# Altium footprint library amirlib.PcbLib: 456 footprints (part 2 of 29)
Each footprint in its own frame and in the unit in brackets; x right, y up, seen from the top. Pads: shape width x height; smd on the part's side, far side on the other; paste and mask are expansions set on the pad; w line width, h text height; cw(c..) or ccw(c..) is an arc to the next point about the centre after c.
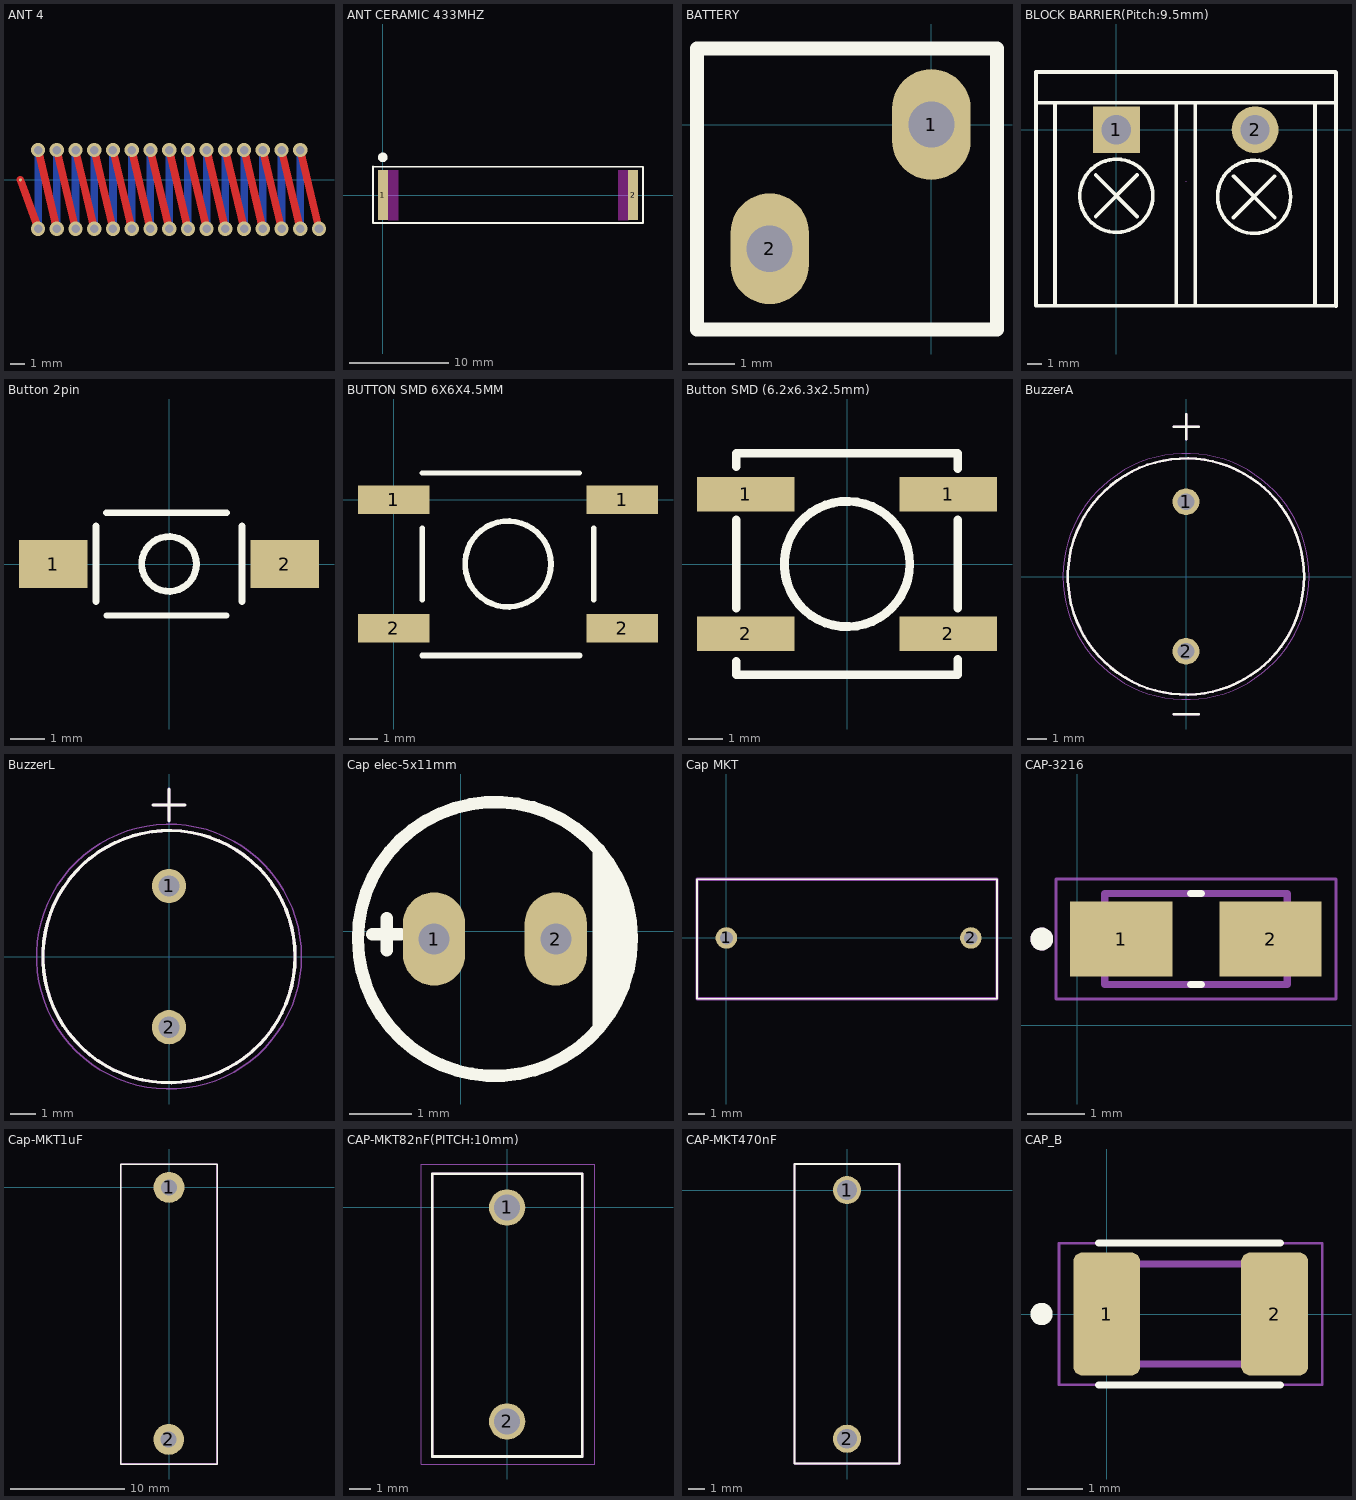
[diagram p1: the footprints below, top view; thin cyan lines are the x and y axes]

## ANT 4 [mm]
pads (1):
  round 0.2 smd: 1(2.642,-0.025)
via 18.349,-3.454 diameter 1 hole 0.6
via 7.827,2.07 diameter 1 hole 0.6
via 3.881,2.07 diameter 1 hole 0.6
via 6.512,2.07 diameter 1 hole 0.6
via 5.196,2.07 diameter 1 hole 0.6
via 5.196,-3.454 diameter 1 hole 0.6
via 6.512,-3.454 diameter 1 hole 0.6
via 13.088,-3.454 diameter 1 hole 0.6
via 20.98,2.07 diameter 1 hole 0.6
via 20.98,-3.454 diameter 1 hole 0.6
via 19.664,2.07 diameter 1 hole 0.6
via 17.034,2.07 diameter 1 hole 0.6
via 18.349,2.07 diameter 1 hole 0.6
via 14.403,2.07 diameter 1 hole 0.6
via 15.718,2.07 diameter 1 hole 0.6
via 14.403,-3.454 diameter 1 hole 0.6
via 15.719,-3.454 diameter 1 hole 0.6
via 17.034,-3.454 diameter 1 hole 0.6
via 19.664,-3.454 diameter 1 hole 0.6
via 13.088,2.07 diameter 1 hole 0.6
via 10.458,-3.454 diameter 1 hole 0.6
via 9.142,-3.454 diameter 1 hole 0.6
via 7.827,-3.454 diameter 1 hole 0.6
via 11.773,-3.454 diameter 1 hole 0.6
via 22.296,-3.454 diameter 1 hole 0.6
via 11.773,2.07 diameter 1 hole 0.6
via 10.458,2.07 diameter 1 hole 0.6
via 9.142,2.07 diameter 1 hole 0.6
via 22.296,2.07 diameter 1 hole 0.6
via 23.612,-3.454 diameter 1 hole 0.6
via 3.881,-3.454 diameter 1 hole 0.6
Top Layer:
  lines w0.5: 6.366,-3.342 ccw(c6.719,-2.988) 6.366,-3.342
  lines w0.536: 2.642,-0.025 3.892,-3.454 ; 3.881,2.07 5.196,-3.454 ; 5.196,2.07 6.512,-3.454 6.428,-3.395 6.395,-3.371 6.366,-3.342 ; 6.512,2.07 7.827,-3.454 ; 7.827,2.07 9.142,-3.454 ; 9.142,2.07 10.458,-3.454 ; 10.458,2.07 11.773,-3.454 ; 11.773,2.07 13.088,-3.454 ; 13.088,2.07 14.403,-3.454 ; 14.403,2.07 15.719,-3.454 ; 15.718,2.07 17.034,-3.454 ; 17.034,2.07 18.349,-3.454 ; 18.349,2.07 19.664,-3.454 ; 19.664,2.07 20.98,-3.454 ; 20.98,2.07 22.296,-3.454 ; 22.296,2.07 23.612,-3.454 ; 5.364,2.158 5.364,2.158
Bottom Layer:
  lines w0.536: 3.881,-3.454 3.881,2.07 ; 5.196,-3.454 5.196,2.07 ; 6.512,-3.454 6.512,2.07 ; 7.827,-3.454 7.827,2.07 ; 9.142,-3.454 9.142,2.07 ; 10.458,-3.454 10.458,2.07 ; 11.773,-3.454 11.773,2.07 ; 13.088,-3.454 13.088,2.07 ; 14.403,-3.454 14.403,2.07 ; 17.034,-3.454 17.034,2.07 ; 18.349,-3.454 18.349,2.07 ; 19.664,-3.454 19.664,2.07 ; 20.98,-3.454 20.98,2.07 ; 22.296,-3.454 22.296,2.07 ; 15.719,-3.454 15.719,2.07 ; 15.719,-3.454 15.719,-3.454 ; 15.718,2.07 15.719,2.07

## ANT CERAMIC 433MHZ [mm]
pads (2):
  rect 1x5 smd: 1(0,0) 2(25,0)
Top Overlay:
  circle w0.5: c-0.025,3.785 r0.23
  lines w0.2: -1,-2.759 26,-2.771 26,2.845 -1,2.857 -1,-2.759
Keep-Out Layer:
  region: 23.543,2.5 24.5,2.5 24.5,-2.5 23.543,-2.5
  region: 0.543,2.5 1.5,2.5 1.5,-2.5 0.543,-2.5
3D body: height 1.2, standoff 0, extent 0.5,-2.5 24.5,2.5
3D body: height 1.2, standoff 0.05, extent 2,-0.389 3.93,0.5
3D body: height 1.2, standoff 0, extent 0,-2.5 0.5,2.5
3D body: height 1.2, standoff 0, extent 24.5,-2.5 25,2.5

## BATTERY [mm]
pads (2):
  oval 1.7x2.4 hole 1 square: 1(0,0) 2(-3.505,-2.692)
Top Overlay:
  lines w0.3: -5.08,-4.445 1.422,-4.445 1.422,1.651 -5.08,1.651 -5.08,-4.445

## BLOCK BARRIER(Pitch:9.5mm) [mm]
pads (2):
  rect 3.21x3.2 hole 2 paste-2539.97 mask+0.051: 1(0,0)
  round 3.2 hole 2 paste-2539.97 mask+0.051: 2(9.5,0)
Top Overlay:
  circle w0.254: c9.43,-4.59 r2.5
  circle w0.254: c0,-4.52 r2.5
  lines w0.254: -5.5,1.855 15,1.855 ; -4.2,-12.051 -4.2,1.749 ; -1.414,-5.934 1.414,-3.106 ; -1.414,-3.106 1.414,-5.934 ; 4.1,-12.051 4.1,1.749 ; 5.4,-12.051 5.4,1.749 ; 8.016,-6.004 10.844,-3.176 ; 8.016,-3.176 10.844,-6.004 ; 13.6,-12.051 13.6,1.749 ; 15,-12.051 -5.5,-12.051 -5.5,3.949 15,3.949 ; 15.037,-12.065 15.037,3.937
Mechanical 15:
  lines w0.003: 4.768,-3.525 4.769,-3.524
3D body "C601239_HB9500M_9p5_2P.step": height 15.4, standoff -5.75, extent -5.376,-14.499 14.824,3.776

## Button 2pin [mm]
pads (2):
  rect 2x1.4 smd: 1(-3.382,0) 2(3.382,0)
Top Overlay:
  circle w0.2: c0,0 r0.8
  lines w0.178: -1.824,-1.499 1.676,-1.499
  lines w0.2: -2.134,-1.092 -2.134,1.108 ; -1.824,1.499 1.676,1.499 ; 2.134,-1.092 2.134,1.108
3D body "434121025816.stp": height 2.5, standoff 0, extent -3.65,-1.975 3.65,1.925

## BUTTON SMD 6X6X4.5MM [mm]
pads (4):
  rect 2.5x1 smd: 1(0,0) 1(7.985,0) 2(0,-4.5) 2(7.985,-4.5)
Top Overlay:
  circle w0.2: c3.992,-2.25 r1.5
  lines w0.178: 0.995,0.925 6.495,0.925
  lines w0.2: 0.992,-3.5 0.992,-1 ; 0.995,-5.45 6.495,-5.45 ; 6.992,-3.5 6.992,-1
3D body "SW3dPS-switch.STEP": height 5, standoff 0, extent -0.507,-5.25 8.493,0.75

## Button SMD (6.2x6.3x2.5mm) [mm]
pads (4):
  rect 2.8x1 smd paste+0 mask+0.051: 1(-2.9,2) 1(2.9,2) 2(-2.9,-2) 2(2.9,-2)
Top Overlay:
  circle w0.254: c0.001,0 r1.797
  lines w0.254: -3.175,-2.794 -3.175,-3.175 3.175,-3.175 3.175,-2.731 ; -3.175,-1.27 -3.175,1.27 ; -3.175,2.794 -3.175,3.175 3.175,3.175 3.175,2.731 ; 3.175,-1.27 3.175,1.269
3D body "43418.stp": height 2.5, standoff 0, extent -3.549,-3.15 3.651,3.15

## BuzzerA [mm]
pads (2):
  round 1.358 hole 0.85: 1(0,3.8) 2(0,-3.8)
Top Overlay:
  circle w0.127: c0,0 r6
  lines w0.127: -0.635,-6.985 0.635,-6.985 ; -0.635,7.62 0.635,7.62 ; 0,6.985 0,8.255
Mechanical 13:
  circle w0.127: c0,0 r6
  lines w0.127: -0.635,-6.985 0.635,-6.985 ; -0.635,7.62 0.635,7.62 ; 0,6.985 0,8.255
Mechanical 15:
  circle w0.05: c0,0 r6.25
3D body "AI-1223-TWT-12V-R--3DModel-STEP-1.STEP": height 9.6, standoff -5.95, extent -6,-5.949 6,7.491

## BuzzerL [mm]
pads (2):
  round 1.358 hole 0.85: 1(0,2.8) 2(0,-2.8)
Top Overlay:
  circle w0.127: c0,0 r5
  lines w0.127: -0.635,6.01 0.635,6.01 ; 0,5.375 0,6.645
Mechanical 13:
  circle w0.127: c0,0 r5
  lines w0.127: -0.635,6.01 0.635,6.01 ; 0,5.375 0,6.645
Mechanical 15:
  circle w0.05: c0,0 r5.25

## Cap elec-5x11mm [mm]
pads (2):
  oval 1x1.5 hole 0.5: 1(-0.432,-0.127) 2(1.524,-0.127)
Top Overlay:
  lines w0.2: -1.422,-0.051 -1.194,-0.051 -0.965,-0.051 ; -1.194,-0.305 -1.194,0.203 ; 2.21,-1.524 2.21,1.27 ; 2.466,-0.937 2.476,-0.927 2.476,0.633 ; 2.616,-0.66 2.616,0.295 ccw(c2.138,0.295) 2.476,0.633 ; 2.746,-0.127 cw(c0.546,-0.127) 2.746,-0.103 ; 2.296,0.993 ccw(c2.731,0.993) 2.423,0.686 2.476,0.633 ; 2.296,0.993 cw(c2.296,0.823) 2.466,0.823 2.466,-1.107 cw(c2.296,-1.107) 2.296,-1.277 2.296,0.993
3D body "CircuitWorks-ELECTROLITIC CAPACITOR RADIAL 5X11.STEP": height 11.1, standoff -2.4, extent -1.954,-2.627 3.046,2.373

## Cap MKT [mm]
pads (2):
  round 1.3 hole 0.8: 1(0,0) 2(14.8,0)
Top Overlay:
  lines w0.1: -1.778,-3.683 16.383,-3.683 16.383,3.556 -1.778,3.556 -1.778,-3.683
Mechanical 15:
  lines w0.2: -1.778,-3.683 16.383,-3.683 16.383,3.556 -1.778,3.556 -1.778,-3.683
3D body "User Library-MKT(15_17x18x7).sldprt": height 2, standoff -13.5, extent -1.708,-3.556 16.292,3.454

## CAP-3216 [mm]
pads (2):
  rect 1.79x1.31 smd: 1(0.776,1.511) 2(3.396,1.511)
Top Overlay:
  circle w0.2: c-0.619,1.511 r0.1
  lines w0.127: 1.991,0.711 2.181,0.711 ; 1.991,2.311 2.181,2.311
Mechanical 13:
  circle w0.2: c-0.619,1.511 r0.1
  lines w0.127: 0.486,0.711 3.686,0.711 3.686,2.311 0.486,2.311 0.486,0.711
Mechanical 15:
  lines w0.05: -0.369,0.461 4.541,0.461 4.541,2.561 -0.369,2.561 -0.369,0.461
3D body "step_temp.STEP": height 1.8, standoff 0, extent 0.486,0.711 3.686,2.311

## Cap-MKT1uF [mm]
pads (2):
  round 2.7 hole 1.4 mask+0.2: 1(0,0) 2(-0.025,-22.1)
Top Overlay:
  lines w0.127: -4.238,-24.25 4.237,-24.25 4.237,2.05 -4.238,2.05 -4.238,-24.25
Mechanical 13:
  lines w0.127: -4.238,-24.25 4.237,-24.25 4.237,2.05 -4.238,2.05 -4.238,-24.25
Mechanical 15:
  lines w0.05: -4.188,-24.175 -4.188,2.05 4.187,2.05 4.187,-24.175 -4.188,-24.175
3D body "MKT Film Capacitor body 26,5x10x18,5mm.SLDPRT": height 1.99, standoff -19.01, extent -4.15,-24.254 4.15,1.954

## CAP-MKT82nF(PITCH:10mm) [mm]
pads (2):
  round 1.7 hole 1.2 mask+0.2: 1(0,0) 2(0,-10)
Top Overlay:
  lines w0.127: 3.5,1.575 -3.5,1.575 -3.5,-11.633 3.51,-11.633 3.51,1.575
Mechanical 13:
  lines w0.127: -3.5,-11.633 3.51,-11.633 3.51,1.575 -3.5,1.575 -3.5,-11.633
Mechanical 15:
  lines w0.05: -4.008,-11.989 -4.008,2.032 4.095,2.032 4.095,-11.989 -4.008,-11.989

## CAP-MKT470nF [mm]
pads (2):
  round 1.7 hole 1.2 mask+0.2: 1(0,0) 2(0,-15)
Top Overlay:
  lines w0.127: -3.175,-16.5 3.175,-16.5 3.175,1.575 -3.175,1.575 -3.175,-16.5
Mechanical 13:
  lines w0.127: -3.175,-16.5 -3.175,1.575 3.15,1.575 3.15,-16.5 -3.175,-16.5
Mechanical 15:
  lines w0.05: -3.15,-16.525 3.175,-16.525 3.175,1.575 -3.15,1.575 -3.15,-16.525
3D body "User Library-B81133C_6x11x18.step": height 11.5, standoff -3, extent -3.025,-16.55 2.975,1.45

## CAP_B [mm]
pads (2):
  rrect25% 1.2x2.2 smd: 1(0,0) 2(3.01,0)
Top Overlay:
  circle w0.2: c-1.168,0 r0.1
  lines w0.127: -0.146,-1.27 3.114,-1.27 ; -0.146,1.27 3.114,1.27
Mechanical 13:
  lines w0.127: -0.245,-0.9 -0.245,0.9 3.255,0.9 3.255,-0.9 -0.245,-0.9
Mechanical 15:
  lines w0.05: -0.855,-1.27 -0.855,1.27 3.865,1.27 3.865,-1.27 -0.855,-1.27
3D body "User Library-tan_b.STEP": height 1.9, standoff 0, extent -0.425,-1.4 3.435,1.4